# Altium integrated library LIB2.IntLib: 62 symbols
Pins are listed as number, name and electrical type; pins without a type are passive.

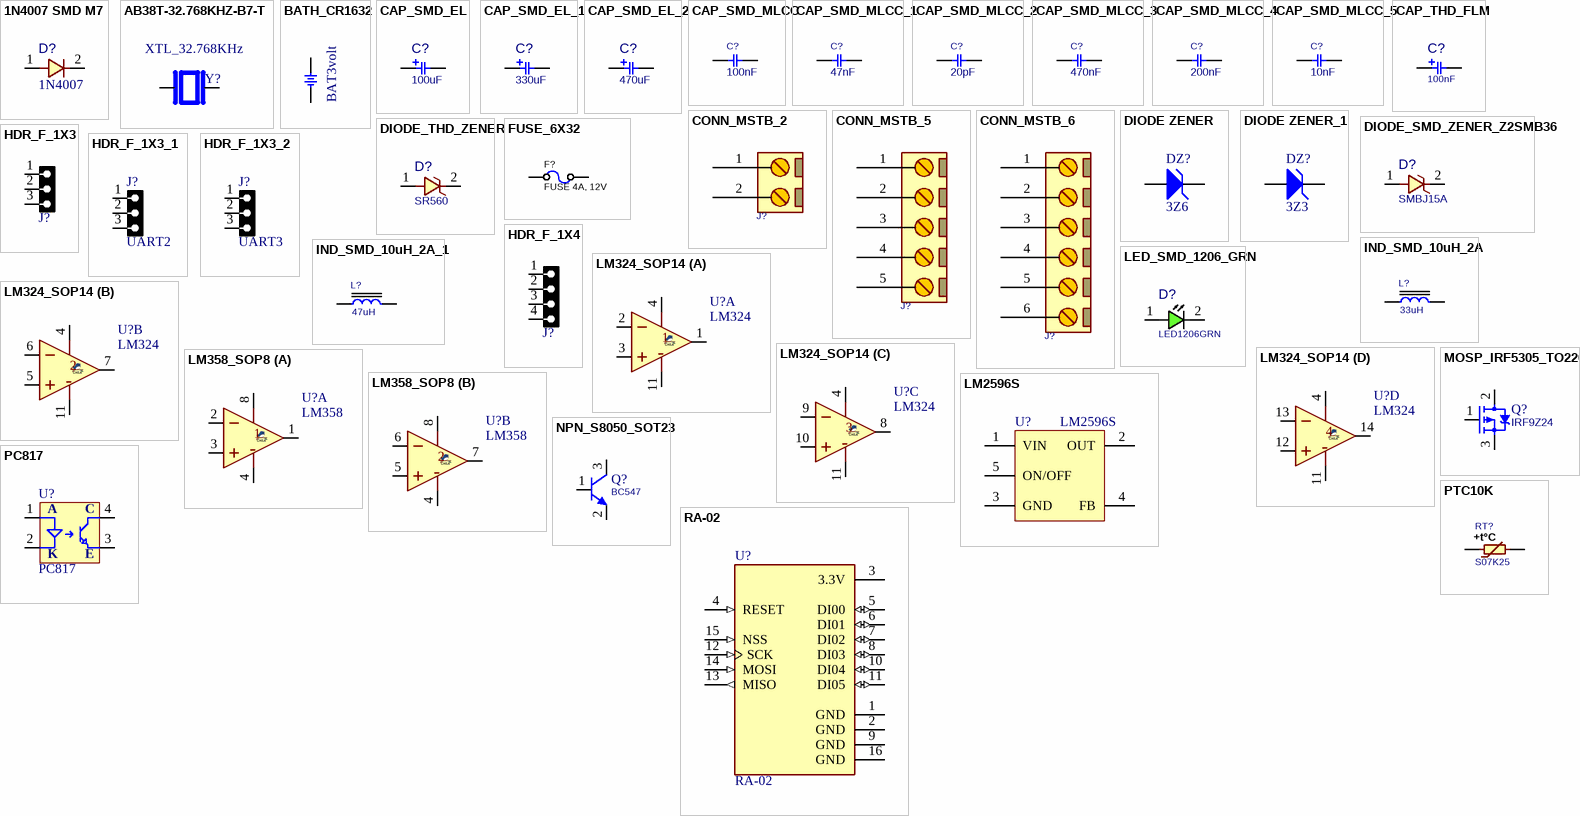
[diagram p0: symbols 1N4007 SMD M7 to RA-02]

## 1N4007 SMD M7
designator D?, comment value 1N4007  (hidden comment: 1n5819 SMD SS31)
DIODE, GENERAL PURPOSE, 1000V/1A; DatasheetVersion: 2021; ComponentLink1Description: Website Smart World; ComponentLink1URL: https://www.smartw.ir/; ComponentLink2Description: Telegram; ComponentLink2URL: https://t.me/altium_smartw; ComponentLink3Description: Instagram; ComponentLink3URL: https://Instagram.com/smartgw.ir
footprint D_SMA (SMA Molded Diode, 2-Leads, Body 4.3x2.7mm)
pins: 1, 2

## AB38T-32.768KHZ-B7-T
designator Y?, comment XTL_32.768KHz
MP: AB38T-32.768KHZ-B7-T; Package: None; Availability: Unavailable; Value: *; Price: None
footprint XTAL_AB38T-32.768KHZ-B7-T
pins: 1, 2

## BATH_CR1632
designator BT?, comment BAT3volt
BATTERY HOLDER, CR1632 CR1620 CR1616; MANF_P#: BH600; .: http://www.chila.ir; VALUE: BAT3volt
footprint BTH1632_BH600 (Battery Holder BH600 CR1632 CR1620 CR1616)
pins: 1, 2

## CAP_SMD_EL
designator C?, comment 100uF
CAP, SMD, ELEC,; MANF_P#: MANF_PART#; PARAM2: -V; DESC: DESCRIPTION; DIST#: MOUSER; PARAM: 20%; PRICE: 10= -$; MANF: MANF; ASSEMBLY: ASSEMBLY; VALUE: 100uF
footprint C_EL_D8L6 (Electrolytic Cap, 8.3X6)
footprint C_EL_D4L4 (Electrolytic Cap, D: 4.3mm, Size B, 3.9mm Height)
footprint C_EL_D5L6 (Electrolytic Cap, D: 5.0mm, L: 5.8mm, Size C)
footprint C_EL_D6L5 (Electrolytic Cap, D: 6.3mm L: 5.4mm, Size D)
footprint C_EL_D10L9 (Electrolytic Cap, 10.3mm, L: 8.7mm)
footprint C_EL_D12L13 (Electrolytic Cap, 12.5x13mm)
footprint C_EL_D4L5 (Electrolytic Cap, D: 4.3mm, Size B, 5.5mm Height)
footprint C_EL_D3L5 (Electrolytic Cap, D: 3.3mm, Size A, 5mm Height)
footprint C_EL_D6L4 (Electrolytic Cap, D: 6.3mm L: 3.9mm, Size D)
footprint C_EL_D6L5A (Electrolytic Cap, D: 6.3mm L: 5.4mm, Size D)
footprint C_EL_D6L6 (Electrolytic Cap, D: 6.3mm L: 5.8mm, Size D)
footprint C_EL_D6L8 (Electrolytic Cap, D: 6.3mm L: 7.7mm, Size D)
footprint C_EL_D8L10 (Electrolytic Cap, Size E, Size F, 8.3X10)
footprint C_EL_D10L10 (Electrolytic Cap, 10.3mm, L: 10mm)
footprint C_EL_D10L12 (Electrolytic Cap, 10.3mm, L: 12.4mm)
footprint C_EL_D17L17 (Electrolytic Cap, 17x17mm)
footprint C_EL_D19L17 (Electrolytic Cap, 19x17mm)
footprint C_EL_D8L10A (Electrolytic Cap, Size E, Size F, 8.3X10)
footprint C_EL_D5L5 (Electrolytic Cap, D: 5.0mm, L: 5.4mm)
pins: 1, 2

## CAP_SMD_EL_1
designator C?, comment 330uF
CAP, SMD, ELEC,; MANF_P#: MANF_PART#; PARAM2: -V; DESC: DESCRIPTION; DIST#: MOUSER; PARAM: 20%; PRICE: 10= -$; MANF: MANF; ASSEMBLY: ASSEMBLY; VALUE: 330uF
footprint C_EL_D8L6 (Electrolytic Cap, 8.3X6)
footprint C_EL_D4L4 (Electrolytic Cap, D: 4.3mm, Size B, 3.9mm Height)
footprint C_EL_D5L6 (Electrolytic Cap, D: 5.0mm, L: 5.8mm, Size C)
footprint C_EL_D6L5 (Electrolytic Cap, D: 6.3mm L: 5.4mm, Size D)
footprint C_EL_D10L9 (Electrolytic Cap, 10.3mm, L: 8.7mm)
footprint C_EL_D12L13 (Electrolytic Cap, 12.5x13mm)
footprint C_EL_D4L5 (Electrolytic Cap, D: 4.3mm, Size B, 5.5mm Height)
footprint C_EL_D3L5 (Electrolytic Cap, D: 3.3mm, Size A, 5mm Height)
footprint C_EL_D6L4 (Electrolytic Cap, D: 6.3mm L: 3.9mm, Size D)
footprint C_EL_D6L5A (Electrolytic Cap, D: 6.3mm L: 5.4mm, Size D)
footprint C_EL_D6L6 (Electrolytic Cap, D: 6.3mm L: 5.8mm, Size D)
footprint C_EL_D6L8 (Electrolytic Cap, D: 6.3mm L: 7.7mm, Size D)
footprint C_EL_D8L10 (Electrolytic Cap, Size E, Size F, 8.3X10)
footprint C_EL_D10L10 (Electrolytic Cap, 10.3mm, L: 10mm)
footprint C_EL_D10L12 (Electrolytic Cap, 10.3mm, L: 12.4mm)
footprint C_EL_D17L17 (Electrolytic Cap, 17x17mm)
footprint C_EL_D19L17 (Electrolytic Cap, 19x17mm)
footprint C_EL_D8L10A (Electrolytic Cap, Size E, Size F, 8.3X10)
footprint C_EL_D5L5 (Electrolytic Cap, D: 5.0mm, L: 5.4mm)
pins: 1, 2

## CAP_SMD_EL_2
designator C?, comment 470uF
CAP, SMD, ELEC,; MANF_P#: MANF_PART#; PARAM2: -V; DESC: DESCRIPTION; DIST#: MOUSER; PARAM: 20%; PRICE: 10= -$; MANF: MANF; ASSEMBLY: ASSEMBLY; VALUE: 470uF
footprint C_EL_D8L6 (Electrolytic Cap, 8.3X6)
footprint C_EL_D4L4 (Electrolytic Cap, D: 4.3mm, Size B, 3.9mm Height)
footprint C_EL_D5L6 (Electrolytic Cap, D: 5.0mm, L: 5.8mm, Size C)
footprint C_EL_D6L5 (Electrolytic Cap, D: 6.3mm L: 5.4mm, Size D)
footprint C_EL_D10L9 (Electrolytic Cap, 10.3mm, L: 8.7mm)
footprint C_EL_D12L13 (Electrolytic Cap, 12.5x13mm)
footprint C_EL_D4L5 (Electrolytic Cap, D: 4.3mm, Size B, 5.5mm Height)
footprint C_EL_D3L5 (Electrolytic Cap, D: 3.3mm, Size A, 5mm Height)
footprint C_EL_D6L4 (Electrolytic Cap, D: 6.3mm L: 3.9mm, Size D)
footprint C_EL_D6L5A (Electrolytic Cap, D: 6.3mm L: 5.4mm, Size D)
footprint C_EL_D6L6 (Electrolytic Cap, D: 6.3mm L: 5.8mm, Size D)
footprint C_EL_D6L8 (Electrolytic Cap, D: 6.3mm L: 7.7mm, Size D)
footprint C_EL_D8L10 (Electrolytic Cap, Size E, Size F, 8.3X10)
footprint C_EL_D10L10 (Electrolytic Cap, 10.3mm, L: 10mm)
footprint C_EL_D10L12 (Electrolytic Cap, 10.3mm, L: 12.4mm)
footprint C_EL_D17L17 (Electrolytic Cap, 17x17mm)
footprint C_EL_D19L17 (Electrolytic Cap, 19x17mm)
footprint C_EL_D8L10A (Electrolytic Cap, Size E, Size F, 8.3X10)
footprint C_EL_D5L5 (Electrolytic Cap, D: 5.0mm, L: 5.4mm)
pins: 1, 2

## CAP_SMD_MLCC
designator C?, comment 100nF
CAP, MLCC; PARAM: C0G, 10%; DESC: CAP, MLCC, 1nF, 50V, C0G, 10%, 0402; MANF_P#: MANF_PART#; MANF: Murata; PARAM2: 50V; VALUE: 20pF; PRICE: 100= 1$; ASSEMBLY: ASSEMBLY
footprint C0402 (CHIP Capacitor, 1.0X0.5mm, 0402)
footprint C0603 (CHIP Capacitor, 1.6X0.8mm, 0603)
footprint C0805 (CHIP Capacitor, 2.0X1.3mm, 0805)
footprint C1206 (CHIP Capacitor, 3.2X1.6mm, 1206)
footprint C1210 (CHIP Capacitor, 3.2X2.5mm, 1210, 3225)
footprint C0508 (CHIP Capacitor, 1.3X2.0mm, 0508)
footprint C1020 (CHIP Capacitor, 2.50x5.00mm)
footprint C1808 (CHIP Capacitor, 4.6X2.0mm, 1808, 1806, 4620, 4520)
footprint C1812 (Chip Capacitor, 4.5x3.2mm, 1612, 1812, 4532)
footprint C1825 (Chip Capacitor, 4.5x6.4mm, 1825, 4564)
footprint C2225 (Chip Capacitor, 5.6x6.4mm, 2225, 5664)
footprint C2512 (Chip Capacitor, 6.4x3.2mm, 2512, 6432)
footprint C0201 (CHIP Capacitor, 0.5x0.25mm, 0201)
footprint C0306 (CHIP Capacitor, 0.8X1.6mm)
footprint C0204 (CHIP Capacitor, 0.5X1.0mm)
footprint C2010 (Chip Capacitor, 5.0x2.5mm)
pins: 1, 2

## CAP_SMD_MLCC_1
designator C?, comment 47nF
CAP, MLCC; PARAM: C0G, 10%; DESC: CAP, MLCC, 1nF, 50V, C0G, 10%, 0402; MANF_P#: MANF_PART#; MANF: Murata; PARAM2: 50V; VALUE: 20pF; PRICE: 100= 1$; ASSEMBLY: ASSEMBLY
footprint C0402 (CHIP Capacitor, 1.0X0.5mm, 0402)
footprint C0603 (CHIP Capacitor, 1.6X0.8mm, 0603)
footprint C0805 (CHIP Capacitor, 2.0X1.3mm, 0805)
footprint C1206 (CHIP Capacitor, 3.2X1.6mm, 1206)
footprint C1210 (CHIP Capacitor, 3.2X2.5mm, 1210, 3225)
footprint C0508 (CHIP Capacitor, 1.3X2.0mm, 0508)
footprint C1020 (CHIP Capacitor, 2.50x5.00mm)
footprint C1808 (CHIP Capacitor, 4.6X2.0mm, 1808, 1806, 4620, 4520)
footprint C1812 (Chip Capacitor, 4.5x3.2mm, 1612, 1812, 4532)
footprint C1825 (Chip Capacitor, 4.5x6.4mm, 1825, 4564)
footprint C2225 (Chip Capacitor, 5.6x6.4mm, 2225, 5664)
footprint C2512 (Chip Capacitor, 6.4x3.2mm, 2512, 6432)
footprint C0201 (CHIP Capacitor, 0.5x0.25mm, 0201)
footprint C0306 (CHIP Capacitor, 0.8X1.6mm)
footprint C0204 (CHIP Capacitor, 0.5X1.0mm)
footprint C2010 (Chip Capacitor, 5.0x2.5mm)
pins: 1, 2

## CAP_SMD_MLCC_2
designator C?, comment 20pF
CAP, MLCC; PARAM: C0G, 10%; DESC: CAP, MLCC, 1nF, 50V, C0G, 10%, 0402; MANF_P#: MANF_PART#; MANF: Murata; PARAM2: 50V; PRICE: 100= 1$; ASSEMBLY: ASSEMBLY; VALUE: 20pF
footprint C0402 (CHIP Capacitor, 1.0X0.5mm, 0402)
footprint C0603 (CHIP Capacitor, 1.6X0.8mm, 0603)
footprint C0805 (CHIP Capacitor, 2.0X1.3mm, 0805)
footprint C1206 (CHIP Capacitor, 3.2X1.6mm, 1206)
footprint C1210 (CHIP Capacitor, 3.2X2.5mm, 1210, 3225)
footprint C0508 (CHIP Capacitor, 1.3X2.0mm, 0508)
footprint C1020 (CHIP Capacitor, 2.50x5.00mm)
footprint C1808 (CHIP Capacitor, 4.6X2.0mm, 1808, 1806, 4620, 4520)
footprint C1812 (Chip Capacitor, 4.5x3.2mm, 1612, 1812, 4532)
footprint C1825 (Chip Capacitor, 4.5x6.4mm, 1825, 4564)
footprint C2225 (Chip Capacitor, 5.6x6.4mm, 2225, 5664)
footprint C2512 (Chip Capacitor, 6.4x3.2mm, 2512, 6432)
footprint C0201 (CHIP Capacitor, 0.5x0.25mm, 0201)
footprint C0306 (CHIP Capacitor, 0.8X1.6mm)
footprint C0204 (CHIP Capacitor, 0.5X1.0mm)
footprint C2010 (Chip Capacitor, 5.0x2.5mm)
pins: 1, 2

## CAP_SMD_MLCC_3
designator C?, comment 470nF
CAP, MLCC; PARAM: C0G, 10%; DESC: CAP, MLCC, 1nF, 50V, C0G, 10%, 0402; MANF_P#: MANF_PART#; MANF: Murata; PARAM2: 50V; VALUE: 20pF; PRICE: 100= 1$; ASSEMBLY: ASSEMBLY
footprint C0402 (CHIP Capacitor, 1.0X0.5mm, 0402)
footprint C0603 (CHIP Capacitor, 1.6X0.8mm, 0603)
footprint C0805 (CHIP Capacitor, 2.0X1.3mm, 0805)
footprint C1206 (CHIP Capacitor, 3.2X1.6mm, 1206)
footprint C1210 (CHIP Capacitor, 3.2X2.5mm, 1210, 3225)
footprint C0508 (CHIP Capacitor, 1.3X2.0mm, 0508)
footprint C1020 (CHIP Capacitor, 2.50x5.00mm)
footprint C1808 (CHIP Capacitor, 4.6X2.0mm, 1808, 1806, 4620, 4520)
footprint C1812 (Chip Capacitor, 4.5x3.2mm, 1612, 1812, 4532)
footprint C1825 (Chip Capacitor, 4.5x6.4mm, 1825, 4564)
footprint C2225 (Chip Capacitor, 5.6x6.4mm, 2225, 5664)
footprint C2512 (Chip Capacitor, 6.4x3.2mm, 2512, 6432)
footprint C0201 (CHIP Capacitor, 0.5x0.25mm, 0201)
footprint C0306 (CHIP Capacitor, 0.8X1.6mm)
footprint C0204 (CHIP Capacitor, 0.5X1.0mm)
footprint C2010 (Chip Capacitor, 5.0x2.5mm)
pins: 1, 2

## CAP_SMD_MLCC_4
designator C?, comment 200nF
CAP, MLCC; PARAM: C0G, 10%; DESC: CAP, MLCC, 1nF, 50V, C0G, 10%, 0402; MANF_P#: MANF_PART#; MANF: Murata; PARAM2: 50V; VALUE: 20pF; PRICE: 100= 1$; ASSEMBLY: ASSEMBLY
footprint C0402 (CHIP Capacitor, 1.0X0.5mm, 0402)
footprint C0603 (CHIP Capacitor, 1.6X0.8mm, 0603)
footprint C0805 (CHIP Capacitor, 2.0X1.3mm, 0805)
footprint C1206 (CHIP Capacitor, 3.2X1.6mm, 1206)
footprint C1210 (CHIP Capacitor, 3.2X2.5mm, 1210, 3225)
footprint C0508 (CHIP Capacitor, 1.3X2.0mm, 0508)
footprint C1020 (CHIP Capacitor, 2.50x5.00mm)
footprint C1808 (CHIP Capacitor, 4.6X2.0mm, 1808, 1806, 4620, 4520)
footprint C1812 (Chip Capacitor, 4.5x3.2mm, 1612, 1812, 4532)
footprint C1825 (Chip Capacitor, 4.5x6.4mm, 1825, 4564)
footprint C2225 (Chip Capacitor, 5.6x6.4mm, 2225, 5664)
footprint C2512 (Chip Capacitor, 6.4x3.2mm, 2512, 6432)
footprint C0201 (CHIP Capacitor, 0.5x0.25mm, 0201)
footprint C0306 (CHIP Capacitor, 0.8X1.6mm)
footprint C0204 (CHIP Capacitor, 0.5X1.0mm)
footprint C2010 (Chip Capacitor, 5.0x2.5mm)
pins: 1, 2

## CAP_SMD_MLCC_5
designator C?, comment 10nF
CAP, MLCC; PARAM: C0G, 10%; DESC: CAP, MLCC, 1nF, 50V, C0G, 10%, 0402; MANF_P#: MANF_PART#; MANF: Murata; PARAM2: 50V; VALUE: 20pF; PRICE: 100= 1$; ASSEMBLY: ASSEMBLY
footprint C0402 (CHIP Capacitor, 1.0X0.5mm, 0402)
footprint C0603 (CHIP Capacitor, 1.6X0.8mm, 0603)
footprint C0805 (CHIP Capacitor, 2.0X1.3mm, 0805)
footprint C1206 (CHIP Capacitor, 3.2X1.6mm, 1206)
footprint C1210 (CHIP Capacitor, 3.2X2.5mm, 1210, 3225)
footprint C0508 (CHIP Capacitor, 1.3X2.0mm, 0508)
footprint C1020 (CHIP Capacitor, 2.50x5.00mm)
footprint C1808 (CHIP Capacitor, 4.6X2.0mm, 1808, 1806, 4620, 4520)
footprint C1812 (Chip Capacitor, 4.5x3.2mm, 1612, 1812, 4532)
footprint C1825 (Chip Capacitor, 4.5x6.4mm, 1825, 4564)
footprint C2225 (Chip Capacitor, 5.6x6.4mm, 2225, 5664)
footprint C2512 (Chip Capacitor, 6.4x3.2mm, 2512, 6432)
footprint C0201 (CHIP Capacitor, 0.5x0.25mm, 0201)
footprint C0306 (CHIP Capacitor, 0.8X1.6mm)
footprint C0204 (CHIP Capacitor, 0.5X1.0mm)
footprint C2010 (Chip Capacitor, 5.0x2.5mm)
pins: 1, 2

## CAP_THD_FLM
designator C?, comment 100nF
CAP, THD, FILM,; MANF_P#: MANF_PART#; PARAM2: 25V; DESC: DESCRIPTION; DIST#: MOUSER; PARAM: 20%; PRICE: 10= 5$; MANF: MANF; ASSEMBLY: ASSEMBLY; VALUE: 100nF
footprint C_FLM_4X2H7 (Capacitor, THT, Metallized Polyester Film 4.6X2.5X6.8mm)
footprint C_FLM_4X3H7 (Capacitor, THT, Metallized Polyester Film, 4.6x3.0x7.5mm)
footprint C_FLM_4X4H8 (Capacitor, THT, Metallized Polyester Film with 4.6x3.8x8.5mm LxTxH)
footprint C_FLM_4X4H9 (Capacitor, THT, Metallized Polyester Film, 4.6x4.6x9.2mm)
footprint C_FLM_4X5H10 (Capacitor, THT, Metallized Polyester Film, 4.6x5.5x10.6mm)
footprint C_FLM_6X2H5 (CAP, FILM MKT, 6.3X2.4mm, pitch: 4.7mm)
footprint C_FLM_6X3H5 (CAP, POLYESTER, 5.8X3.5mm pitch: 5.0mm)
footprint C_FLM_6X4H12 (Capacitor, THT, Metallized Polyester Film, 6x4x12mm)
footprint C_FLM_7X2H6 (Capacitor, THT, Metallized Polyester Film with 7.2x2.5x6.5mm LxTxH)
footprint C_FLM_7X2H7 (CAP, POLYESTER, 7.5x2.5x7mm pitch: 5.0mm)
footprint C_FLM_7X3H6 (Capacitor, THT, Metallized Polyester Film with 7.2x3.0x6.5mm LxTxH)
footprint C_FLM_7X3H6R (Capacitor, THT, Metallized Polyester Film with 7.2x3.0x6.5mm LxTxH)
footprint C_FLM_7X3H8 (Capacitor, THT, Metallized Polyester Film with 7.2x3.5x8.5mm LxTxH)
footprint C_FLM_7X3H8R (Capacitor, THT, Metallized Polyester Film with 7.2x3.5x8.0mm LxTxH)
footprint C_FLM_7X4H6 (Capacitor, THT, Metallized Polyester Film with 7.2x4.5x6mm LxTxH)
footprint C_FLM_7X4H9 (Capacitor, THT, Metallized Polyester Film with 7.2x4.5x9.5mm LxTxH)
footprint C_FLM_7X5H7 (Capacitor, THT, Metallized Polyester Film with 7.2x5.5x7mm LxTxH)
footprint C_FLM_7X5H9R (Capacitor, THT, Metallized Polyester Film with 7.6x5.0x9.2mm LxTxH)
footprint C_FLM_7X5H10 (Capacitor, THT, Metallized Polyester Film with 7.2x5.0x10mm LxTxH)
footprint C_FLM_7X5H11 (Capacitor, THT, Metallized Polyester Film with 7.2x5.5x11.5mm LxTxH)
footprint C_FLM_7X5X10 (CAP, POLYESTER, 7.0X5.0x10mm pitch: 5.0mm)
footprint C_FLM_7X6H8 (CAP, POLYESTER, 7.3X6.5mm pitch: 5.0mm)
footprint C_FLM_7X6H7 (Capacitor, THT, Metallized Polyester Film with 7.2x6.5x7.0mm LxTxH)
footprint C_FLM_7X6H10 (Capacitor, THT, Metallized Polyester Film, 7.3x6.5x10)
footprint C_FLM_7X7H8 (Capacitor, THT, Metallized Polyester Film with 7.2x7.2x8.5mm LxTxH)
footprint C_FLM_7X7H10R (Capacitor, THT, Metallized Polyester Film with 7.6x7.0x10.6mm TxHxW)
footprint C_FLM_7X7H13 (Capacitor, THT, Metallized Polyester Film with 7.2x7.2x13mm LxTxH)
footprint C_FLM_7X8H10 (Capacitor, THT, Metallized Polyester Film with 7.2x8.5x10mm LxTxH)
footprint C_FLM_7X8H14 (Capacitor, THT, Metallized Polyester Film with 7.2x8.5x14mm LxTxH)
footprint C_FLM_7X9H10 (CAP, POLYESTER, 7.2X8.5x10mm pitch: 5.0mm)
footprint C_FLM_7X11H16 (Capacitor, THT, Metallized Polyester Film with 7.2x11x16mm LxTxH)
footprint C_FLM_8X8H13R (Capacitor, THT, Metallized Polyester Film with 7.8x7.8x13.0mm LxTxH)
footprint C_FLM_9X6H9 (CAP, POLYESTER, 9.3X5.2mm pitch: 7.6mm)
footprint C_FLM_10X2H7 (Capacitor, THT, Metallized Polyester Film 10x2.5x7mm LxTxH)
footprint C_FLM_10X3H7 (Capacitor, THT, Metallized Polyester Film 10x3x7mm LxTxH)
footprint C_FLM_10X4H7 (Capacitor, THT, Metallized Polyester Film 10x4.5x7mm LxTxH)
footprint C_FLM_10X4H8R (Capacitor, THT, Metallized Polyester Film with 3.5x9.5x10.0mm TxHxW)
footprint C_FLM_10X5H7 (Capacitor, THT, Metallized Polyester Film 10x5x7mm LxTxH)
footprint C_FLM_10X5H8 (CAP, POLYESTER, 10X5.5mm pitch: 7.6mm)
footprint C_FLM_10X6H7 (Capacitor, THT, Metallized Polyester Film with 10x5.7x7mm LxTxH)
footprint C_FLM_10X6X9 (CAP, POLYESTER, 10.5X6.0X9.0mm pitch: 7.6mm)
footprint C_FLM_10X6X12 (CAP, POLYESTER, 10.3X6.0X12.0mm pitch: 7.6mm)
footprint C_FLM_10X7H7 (Capacitor, THT, Metallized Polyester Film 10x7.2x7mm LxTxH)
footprint C_FLM_10X8H9 (CAP, POLYESTER, 10.0X8.0 pitch: 7.6mm)
footprint C_FLM_11X4H8 (CAP, POLYESTER, 11.4X3.8X7.8mm pitch: 10mm, 0.1uF 400V)
footprint C_FLM_12X4H9 (CAP, POLYESTER, 12.5X4.5X9.0 pitch: 10mm)
footprint C_FLM_12X4H10 (Capacitor, THT, Metallized Polyester Film. 12.5x4.5x10mm)
footprint C_FLM_13X3H8 (Capacitor, THT, Metallized Polyester Film 13x3x8.5mm LxTxH)
footprint C_FLM_13X3H9 (Capacitor, THT, Metallized Polyester Film with 13x3x9mm LxTxH)
footprint C_FLM_13X4H8 (Capacitor, THT, Metallized Polyester Film 13.5x4x8.5mm LxTxH)
footprint C_FLM_13X4H9 (Capacitor, THT, Metallized Polyester Film 13x4x9.5mm LxTxH)
footprint C_FLM_13X5H9 (CAP, POLYESTER, 12.8X4.8 pitch: 10mm)
footprint C_FLM_13X5H10 (Capacitor, THT, Metallized Polyester Film 13x5x10mm LxTxH)
footprint C_FLM_13X5H11 (Capacitor, THT, Metallized Polyester Film 13x5x11mm LxTxH)
footprint C_FLM_13X5H12 (Capacitor, THT, Metallized Polyester Film 13x5x12mm LxTxH)
footprint C_FLM_13X6H12 (Capacitor, THT, Metallized Polyester Film with 13x6x12.5mm LxTxH)
footprint C_FLM_13X6H13 (Capacitor, THT, Metallized Polyester Film 13x6x13mm LxTxH)
footprint C_FLM_13X8H12 (Capacitor, THT, Metallized Polyester Film 13x8x12mm LxTxH)
footprint C_FLM_17X7H14 (CAP, POLYESTER, 17X7mm pitch: 15.0mm, 0.33uF 400V)
footprint C_FLM_18X5H11 (Capacitor, THT, Metallized Polyester Film 18x5x11mm LxTxH)
footprint C_FLM_18X6H12 (Capacitor, THT, Metallized Polyester Film 18x6x12.5mm LxTxH)
footprint C_FLM_18X7H14 (Capacitor, THT, Metallized Polyester Film 18x7x14mm LxTxH)
footprint C_FLM_18X8H15 (Capacitor, THT, Metallized Polyester Film 18x8x15mm LxTxH)
footprint C_FLM_18X9H14 (Capacitor, THT, Metallized Polyester Film 18x9x14mm LxTxH)
footprint C_FLM_18X9H16 (Capacitor, THT, Metallized Polyester Film 18x9x16mm LxTxH)
footprint C_FLM_18X11H14 (Capacitor, THT, Metallized Polyester Film 18x11x14mm LxTxH)
footprint C_FLM_19X5H13 (Capacitor, THT, Metallized Polyester Film 19x5x13mm LxTxH)
footprint C_FLM_19X6H14 (Capacitor, THT, Metallized Polyester Film 19x6x14mm LxTxH)
footprint C_FLM_19X7H15 (Capacitor, THT, Metallized Polyester Film 19x7x15mm LxTxH)
footprint C_FLM_19X8H11 (CAP, POLYESTER, MKT, 18X5, 19.0X8.0mm pitch: 15.0mm, 0.22uF 400V)
footprint C_FLM_19X8H17 (Capacitor, THT, Metallized Polyester Film 19x8x17mm LxTxH)
footprint C_FLM_19X10H18 (Capacitor, THT, Metallized Polyester Film 19x10x18 LxTxH)
footprint C_FLM_22X7H14 (CAP, POLYESTER, 33.0X7.0mm pitch: 20.0mm, 0.68uF 400V)
footprint C_FLM_24X6H9 (CAP, POLYESTER, 23.8X5.8mm pitch: 20.0mm, 0.33uF 400V)
footprint C_FLM_25X10H20 (Capacitor, THT, Metallized Polyester Film, 25x10x20)
footprint C_FLM_25X10H21 (Capacitor, THT, Metallized Polyester Film, 25x10x21mm)
footprint C_FLM_26X5H14 (Capacitor, THT, Metallized Polyester Film 26.5x5x14mm LxTxH)
footprint C_FLM_26X6H15 (Capacitor, THT, Metallized Polyester Film 26.5x6x15mm LxTxH)
footprint C_FLM_26X7H16 (Capacitor, THT, Metallized Polyester Film with 26.5x7x16.5mm LxTxH)
footprint C_FLM_26X8H15 (CAP, POLYESTER, 26.0X7.8mm pitch: 22.5mm, 0.68uF 400V)
footprint C_FLM_26X8H18 (Capacitor, THT, Metallized Polyester Film with 26.5x8.5x18.5mm LxTxH)
footprint C_FLM_26X9H14 (CAP, POLYESTER, 26.0X9.3mm pitch: 22.5mm, 0.68uF 400V)
footprint C_FLM_26X10H19 (Capacitor, THT, Metallized Polyester Film with 26.5x10.5x19mm LxTxH)
footprint C_FLM_26X10H20 (Capacitor, THT, Metallized Polyester Film with 26.5x10.5x20.5mm LxTxH)
footprint C_FLM_26X11H21 (Capacitor, THT, Metallized Polyester Film with 26.5x11x21mm LxTxH)
footprint C_FLM_28X8H20 (Capacitor, THT, Metallized Polyester Film with 28x8x20mm LxTxH)
footprint C_FLM_28X10H20 (Capacitor, THT, Metallized Polyester Film with 28x10x20mm LxTxH)
footprint C_FLM_28X12H21 (Capacitor, THT, Metallized Polyester Film with 28x12x21mm LxTxH)
pins: 1, 2

## CONN_MSTB_2
designator J?, comment CONN_TB2  (value not drawn)
CONN, PHOENIX MSTB, 5-G, 5.08mm pitch; PARAM2: 320V; PARAM: 12A; VALUE: CONN_TB2
footprint MSTB_2 (PHOENIX MSTB 2, 5-G, 5.08mm pitch, 2pin)
pins: 1, 2

## CONN_MSTB_5
designator J?, comment CONN_TB5  (value not drawn)
CONN, PHOENIX MSTB, 5-G, 5.08mm pitch; PARAM2: 320V; PARAM: 12A; VALUE: CONN_TB5
footprint MSTB_5 (PHOENIX MSTB 2, 5-G, 5.08mm pitch)
pins: 1, 2, 3, 4, 5

## CONN_MSTB_6
designator J?, comment CONN_TB6  (value not drawn)
CONN, PHOENIX MSTB, 5-G, 5.08mm pitch; PARAM2: 320V; PARAM: 12A; VALUE: CONN_TB6
footprint MSTB_6 (PHOENIX MSTB 2, 5-G, 5.08mm pitch)
pins: 1, 2, 3, 4, 5, 6

## DIODE ZENER
designator DZ?, comment 3Z6
footprint MELF
footprint SOD 87
footprint MELF Mini
pins: 1 A, 2 K

## DIODE ZENER_1
designator DZ?, comment 3Z3
footprint MELF
footprint SOD 87
footprint MELF Mini
pins: 1 A, 2 K

## DIODE_SMD_ZENER_Z2SMB36
designator D?, comment SMBJ15A
DIODE, ZENER, 2W, 36V; MANF: Diotec; DESC: DESCRIPTION; PARAM: 2W, 16Ohm, -50~150°C; MANF_P#: Z2SMB36; ASSEMBLY: ASSEMBLY; PRICE: -; PARAM2: 36V; VALUE: SMBJ15A
footprint D_SMB (SMB Molded Diode, 2-Leads, Body 4.3x3.5mm)
pins: 1, 2

## DIODE_THD_ZENER
designator D?, comment SR560
DIODE, ZENER, 0.2W, 15V; MANF: Diodes; DESC: DESCRIPTION; MANF_P#: ZENER15V; ASSEMBLY: ASSEMBLY; PRICE: PRICE; PARAM2: 0.2W; PARAM: 15V; VALUE: SR560
footprint D_AX04_DO41 (DO-41)
footprint D_AX02_DO35 (DIODE 0.2 INCH SPACING DO-35)
footprint D_AX03_DO35
pins: 1, 2

## FUSE_6X32
designator F?, comment FUSE 4A, 12V
Fuse HOLDER 5X20; PARAM: 30A; MANF_P#: MANF_PART#; PARAM2: 125VAC; MANF: MANF; VALUE: FUSE 4A, 12V
footprint FUSH_6X32MM_4PIN (PCB Fuse Holder 6x32mm 2 PIN, pitch: 15.0mm  24x9mm)
pins: 1, 2

## HDR_F_1X3
designator J?, comment HDRF3  (value not drawn)
CONN, HEADER, Female, pitch: 2.54mm, 3POS; VALUE: HDRF3
footprint HDR_F_1X3 (HEADER FEMALE pitch: 2.54mm)
pins: 1, 2, 3

## HDR_F_1X3_1
designator J?, comment UART2
CONN, HEADER, Female, pitch: 2.54mm, 3POS; VALUE: HDRF3
footprint HDR_F_1X3 (HEADER FEMALE pitch: 2.54mm)
pins: 1, 2, 3

## HDR_F_1X3_2
designator J?, comment UART3
CONN, HEADER, Female, pitch: 2.54mm, 3POS; VALUE: HDRF3
footprint HDR_F_1X3 (HEADER FEMALE pitch: 2.54mm)
pins: 1, 2, 3

## HDR_F_1X4
designator J?, comment HDRF4  (value not drawn)
CONN, HEADER, Female, pitch: 2.54mm, 4POS; VALUE: HDRF4
footprint HDR_F_1X4 (HEADER FEMALE pitch: 2.54mm)
pins: 1, 2, 3, 4

## IND_SMD_10uH_2A
designator L?, comment 33uH
INDUCTOR, 10uH 2A, 38mOhm, 2626; PARAM: 2A Irms, 2.05A Isat; MANF_P#: SRR6038-100Y; MANF: Bourns; PRICE: 2.5$; DESC: INDUCTOR, 10uH 2A, 38mOhm, 2626; PARAM2: 38mOhm; ASSEMBLY: ASSEMBLY; VALUE: 10uH
footprint L_7 (INDUCTOR, 7.2X6.9mm, 7.1X6.5mm, SPM6530)
pins: 1, 2

## IND_SMD_10uH_2A_1
designator L?, comment 47uH
INDUCTOR, 10uH 2A, 38mOhm, 2626; PARAM: 2A Irms, 2.05A Isat; MANF_P#: SRR6038-100Y; MANF: Bourns; PRICE: 2.5$; DESC: INDUCTOR, 10uH 2A, 38mOhm, 2626; PARAM2: 38mOhm; ASSEMBLY: ASSEMBLY; VALUE: 10uH
footprint L_7 (INDUCTOR, 7.2X6.9mm, 7.1X6.5mm, SPM6530)
pins: 1, 2

## LED_SMD_1206_GRN
designator D?, comment LED1206GRN
LED, SMD, 1206, GREEN; PARAM: 20mA; DESC: DESCRIPTION; PARAM2: 2.2V; MANF: -; ASSEMBLY: ASSEMBLY; PRICE: 36t@Javan; MANF_P#: -; VALUE: LED1206GRN
footprint LED1206GRN (LED, 1206, GREEN)
pins: 1 ANODE, 2 CATHODE

## LM324_SOP14
designator U?, comment LM324
AMP, Quad, Single-Supply; MANF: ON, Texas Instruments, ST; MANF_P#: LM324AD; VALUE: LM324
footprint SO_14
pins on every part: 4 V+, 11 V-
part A pins: 1 OUT, 2 IN-, 3 IN+
part B pins: 5 IN+, 6 IN-, 7 OUT
part C pins: 8 OUT, 9 IN-, 10 IN+
part D pins: 12 IN+, 13 IN-, 14 OUT

## LM358_SOP8
designator U?, comment LM358
AMP, Dual, Low-Power; MANF: Texas Instruments, Fairchild; MANF_P#: LM358AMX; PARAM2: 3 V ~ 32 V, ±1.5 V ~ 16 V; PRICE: 1=0.47, 25=0.31, 100=0.2547, 250=0.21224, 500=0.17632, 750=0.14692, 1000=0.1306 (USD); VALUE: LM358
footprint SO_8
pins on every part: 4 V-, 8 V+
part A pins: 1 OUT, 2 IN-, 3 IN+
part B pins: 5 IN+, 6 IN-, 7 OUT

## LM2596S
designator U?
footprint TO - 263
pins: 1 VIN, 2 OUT, 3 GND, 4 FB, 5 ON/OFF

## MOSP_IRF5305_TO220
designator Q?, comment IRF9Z24
MOSFET P-CHANNEL, 55V, -31A, 6mO, Vth-4.0; MANF_P#: IRF5305; ASSEMBLY: ASSEMBLY; VALUE: IRF9Z24
footprint TO220_3 (TO-220 3 LEAD, TO-262, pitch: 2.54mm  10x4.5mm)
pins: 1 G, 2 D, 3 S

## NPN_S8050_SOT23
designator Q?, comment BC547
BJT, NPN, 25v, 0.5A, SMD, SOT23; PARAM2: 300mW; MANF_P#: S8050; PARAM: 25v, 0.5A; MANF: -; VALUE: BC547
footprint SOT23_3 (SOT-23, Micro3, MO-178, TO-236AB, MO-193C, SuperSOT3, SC-59, DSO190_3_300X150)
simulation model NS3904
pins: 1 B, 2 E, 3 C

## PC817
designator U?
footprint DIP-4
footprint PC817
pins: 1 A, 2 K, 3 E, 4 C

## PTC10K
designator RT?, comment S07K25
Thermistor, NTC; MANF_P#: PTC; PARAM: 10K; MANF: -; PARAM2: -; PRICE: -; VALUE: S07K25
footprint NTC_15X6 (NTC, pitch 5mm, 15X6mm, B57153)
pins: 1, 2
text: +t°C

## RA-02
designator U?
General ISM < 1GHz LoRaâ„¢ Transceiver Module 410MHz ~ 525MHz Antenna Not Included, I-PEX Surface Mount; MF: Ai-Thinker; SnapEDA_Link: https://www.snapeda.com/parts/RA-02/AI-Thinker/view-part/?ref=snap; Package: None; Value: *; MP: RA-02; Check_prices: https://www.snapeda.com/parts/RA-02/AI-Thinker/view-part/?ref=eda
footprint RA-02
pins: 1 GND (power), 2 GND (power), 3 3.3V (power), 4 RESET (in), 5 DI00 (io), 6 DI01 (io), 7 DI02 (io), 8 DI03 (io), 9 GND (power), 10 DI04 (io), 11 DI05 (io), 12 SCK (in), 13 MISO (out), 14 MOSI (in), 15 NSS (in), 16 GND (power)

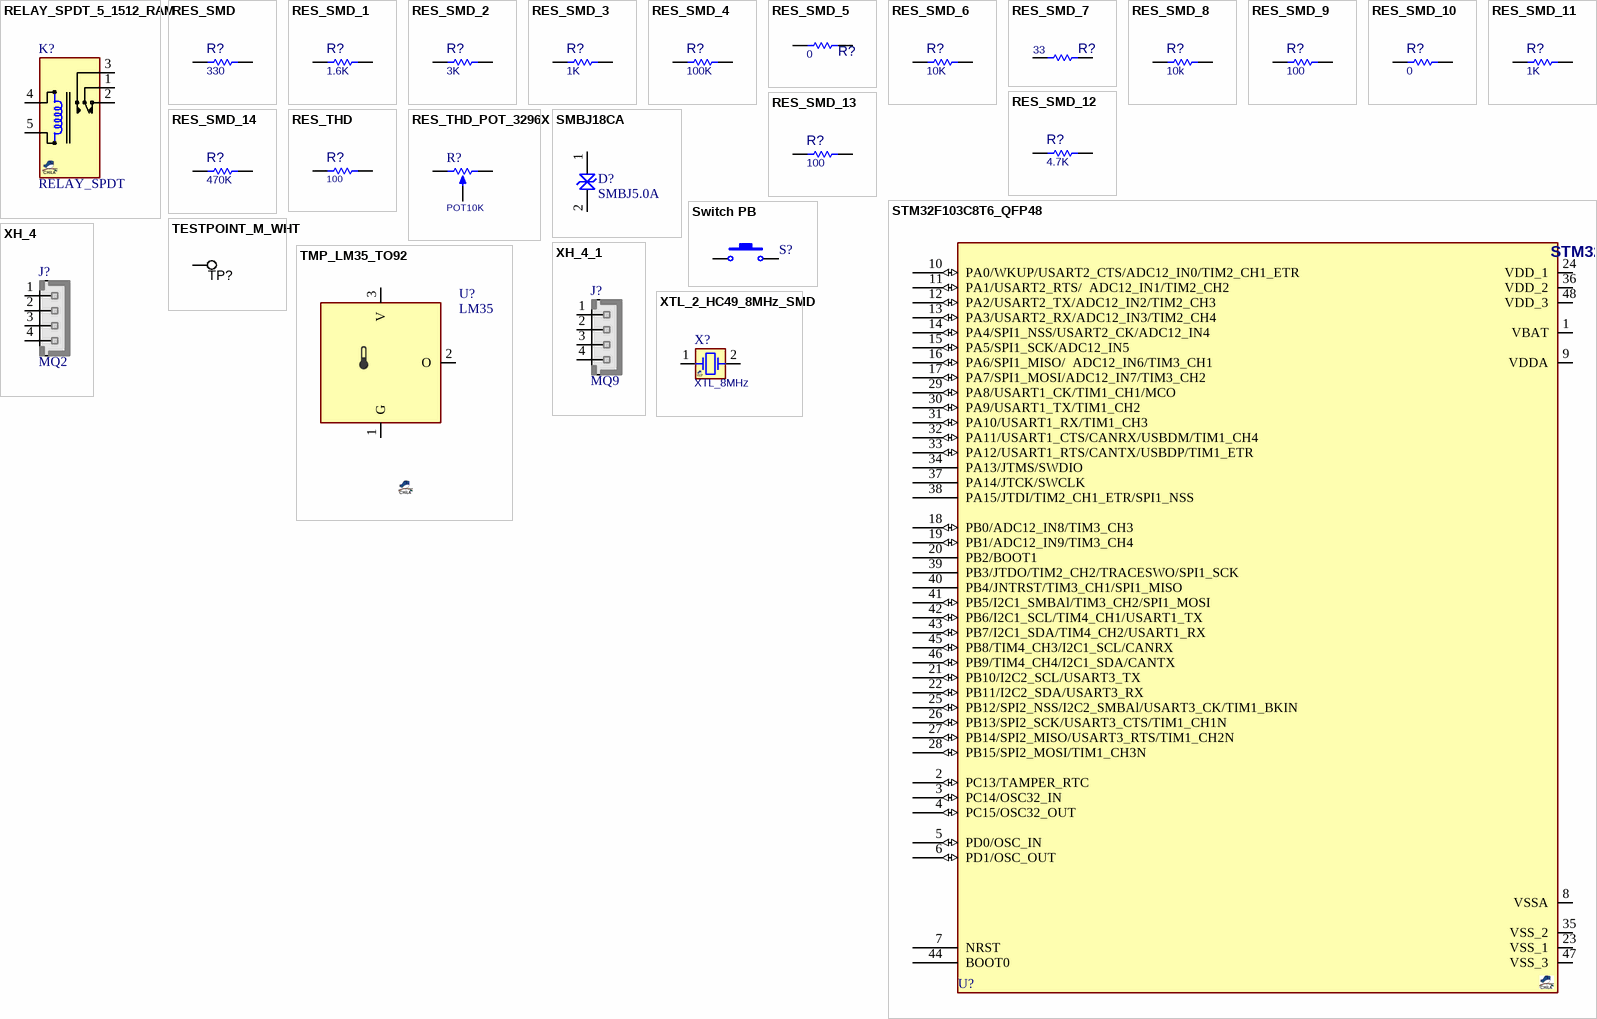
[diagram p1: symbols RELAY_SPDT_5_1512_RAM to XTL_2_HC49_8MHz_SMD]

## RELAY_SPDT_5_1512_RAM
designator K?, comment RELAY_SPDT
Relay, SPDT, 5P, 15.4X12.1mm, 14V/20A; MANF: SUN HOLD; MANF_P#: RAM-1C-12; PARAM2: 14V, 20A; PARAM: 12V, 50mA; PRICE: PRICE; Value: RELAY_SPDT
footprint REL_SPDT_5_1512 (RELAY, SPDT, 15.40x12.10x14.0mm, G8QN, SUN HOLD RAM)
simulation model SPDTRELAY (Spice Subcircuit)
pins: 1 COM, 2 NC, 3 NO, 4 T1, 5 T2

## RES_SMD
designator R?, comment 330
RESISTOR, SMD; PARAM: -W; DESC: DESCRIPTION; DIST#: MOUSER; PARAM2: 1%; VALUE: 470; MANF_P#: -; MANF: -; ASSEMBLY: ASSEMBLY; PRICE: 100= 0.5$
footprint R0402 (CHIP Resistor 1/16 WATT, 1.0X0.5mm, 0402, 1005)
footprint R0603 (CHIP Resistor 1/10 WATT, 1.6x0.8mm, 0603, 1608)
footprint R0805 (CHIP RESISTOR 1/8 WATT ,2.0X1.3mm, 0805, 2012)
footprint R1206 (CHIP RESISTOR 1/4 WATT, Body 3.2x1.6mm,1206, 3216)
footprint R2512 (CHIP RESISTOR 1 WATT, 6.4X3.2mm, 2512, 6432)
footprint R2010 (CHIP RESISTOR 3/4 WATT, 5.1x3mm, 2010, 5025)
footprint R1210 (CHIP RESISTOR 1/2 WATT, Body 3.2x2.5mm,1210, 3225)
footprint R0201 (CHIP Capacitor, 0.5x0.25mm, 0201)
footprint TO220_3
pins: 1, 2

## RES_SMD_1
designator R?, comment 1.6K
RESISTOR, SMD; PARAM: -W; DESC: DESCRIPTION; DIST#: MOUSER; PARAM2: 1%; VALUE: 470; MANF_P#: -; MANF: -; ASSEMBLY: ASSEMBLY; PRICE: 100= 0.5$
footprint R0402 (CHIP Resistor 1/16 WATT, 1.0X0.5mm, 0402, 1005)
footprint R0603 (CHIP Resistor 1/10 WATT, 1.6x0.8mm, 0603, 1608)
footprint R0805 (CHIP RESISTOR 1/8 WATT ,2.0X1.3mm, 0805, 2012)
footprint R1206 (CHIP RESISTOR 1/4 WATT, Body 3.2x1.6mm,1206, 3216)
footprint R2512 (CHIP RESISTOR 1 WATT, 6.4X3.2mm, 2512, 6432)
footprint R2010 (CHIP RESISTOR 3/4 WATT, 5.1x3mm, 2010, 5025)
footprint R1210 (CHIP RESISTOR 1/2 WATT, Body 3.2x2.5mm,1210, 3225)
footprint R0201 (CHIP Capacitor, 0.5x0.25mm, 0201)
footprint TO220_3
pins: 1, 2

## RES_SMD_2
designator R?, comment 3K
RESISTOR, SMD; PARAM: -W; DESC: DESCRIPTION; DIST#: MOUSER; PARAM2: 1%; VALUE: 470; MANF_P#: -; MANF: -; ASSEMBLY: ASSEMBLY; PRICE: 100= 0.5$
footprint R0402 (CHIP Resistor 1/16 WATT, 1.0X0.5mm, 0402, 1005)
footprint R0603 (CHIP Resistor 1/10 WATT, 1.6x0.8mm, 0603, 1608)
footprint R0805 (CHIP RESISTOR 1/8 WATT ,2.0X1.3mm, 0805, 2012)
footprint R1206 (CHIP RESISTOR 1/4 WATT, Body 3.2x1.6mm,1206, 3216)
footprint R2512 (CHIP RESISTOR 1 WATT, 6.4X3.2mm, 2512, 6432)
footprint R2010 (CHIP RESISTOR 3/4 WATT, 5.1x3mm, 2010, 5025)
footprint R1210 (CHIP RESISTOR 1/2 WATT, Body 3.2x2.5mm,1210, 3225)
footprint R0201 (CHIP Capacitor, 0.5x0.25mm, 0201)
footprint TO220_3
pins: 1, 2

## RES_SMD_3
designator R?, comment 1K
RESISTOR, SMD; PARAM: -W; DESC: DESCRIPTION; DIST#: MOUSER; PARAM2: 1%; VALUE: 470; MANF_P#: -; MANF: -; ASSEMBLY: ASSEMBLY; PRICE: 100= 0.5$
footprint R0402 (CHIP Resistor 1/16 WATT, 1.0X0.5mm, 0402, 1005)
footprint R0603 (CHIP Resistor 1/10 WATT, 1.6x0.8mm, 0603, 1608)
footprint R0805 (CHIP RESISTOR 1/8 WATT ,2.0X1.3mm, 0805, 2012)
footprint R1206 (CHIP RESISTOR 1/4 WATT, Body 3.2x1.6mm,1206, 3216)
footprint R2512 (CHIP RESISTOR 1 WATT, 6.4X3.2mm, 2512, 6432)
footprint R2010 (CHIP RESISTOR 3/4 WATT, 5.1x3mm, 2010, 5025)
footprint R1210 (CHIP RESISTOR 1/2 WATT, Body 3.2x2.5mm,1210, 3225)
footprint R0201 (CHIP Capacitor, 0.5x0.25mm, 0201)
footprint TO220_3
pins: 1, 2

## RES_SMD_4
designator R?, comment 100K
RESISTOR, SMD; PARAM: -W; DESC: DESCRIPTION; DIST#: MOUSER; PARAM2: 1%; VALUE: 470; MANF_P#: -; MANF: -; ASSEMBLY: ASSEMBLY; PRICE: 100= 0.5$
footprint R0402 (CHIP Resistor 1/16 WATT, 1.0X0.5mm, 0402, 1005)
footprint R0603 (CHIP Resistor 1/10 WATT, 1.6x0.8mm, 0603, 1608)
footprint R0805 (CHIP RESISTOR 1/8 WATT ,2.0X1.3mm, 0805, 2012)
footprint R1206 (CHIP RESISTOR 1/4 WATT, Body 3.2x1.6mm,1206, 3216)
footprint R2512 (CHIP RESISTOR 1 WATT, 6.4X3.2mm, 2512, 6432)
footprint R2010 (CHIP RESISTOR 3/4 WATT, 5.1x3mm, 2010, 5025)
footprint R1210 (CHIP RESISTOR 1/2 WATT, Body 3.2x2.5mm,1210, 3225)
footprint R0201 (CHIP Capacitor, 0.5x0.25mm, 0201)
footprint TO220_3
pins: 1, 2

## RES_SMD_5
designator R?, comment 0
RESISTOR, SMD; PARAM: -W; DESC: DESCRIPTION; DIST#: MOUSER; PARAM2: 1%; VALUE: 470; MANF_P#: -; MANF: -; ASSEMBLY: ASSEMBLY; PRICE: 100= 0.5$
footprint R0402 (CHIP Resistor 1/16 WATT, 1.0X0.5mm, 0402, 1005)
footprint R0603 (CHIP Resistor 1/10 WATT, 1.6x0.8mm, 0603, 1608)
footprint R0805 (CHIP RESISTOR 1/8 WATT ,2.0X1.3mm, 0805, 2012)
footprint R1206 (CHIP RESISTOR 1/4 WATT, Body 3.2x1.6mm,1206, 3216)
footprint R2512 (CHIP RESISTOR 1 WATT, 6.4X3.2mm, 2512, 6432)
footprint R2010 (CHIP RESISTOR 3/4 WATT, 5.1x3mm, 2010, 5025)
footprint R1210 (CHIP RESISTOR 1/2 WATT, Body 3.2x2.5mm,1210, 3225)
footprint R0201 (CHIP Capacitor, 0.5x0.25mm, 0201)
footprint TO220_3
pins: 1, 2

## RES_SMD_6
designator R?, comment 10K
RESISTOR, SMD; PARAM: -W; DESC: DESCRIPTION; DIST#: MOUSER; PARAM2: 1%; VALUE: 470; MANF_P#: -; MANF: -; ASSEMBLY: ASSEMBLY; PRICE: 100= 0.5$
footprint R0402 (CHIP Resistor 1/16 WATT, 1.0X0.5mm, 0402, 1005)
footprint R0603 (CHIP Resistor 1/10 WATT, 1.6x0.8mm, 0603, 1608)
footprint R0805 (CHIP RESISTOR 1/8 WATT ,2.0X1.3mm, 0805, 2012)
footprint R1206 (CHIP RESISTOR 1/4 WATT, Body 3.2x1.6mm,1206, 3216)
footprint R2512 (CHIP RESISTOR 1 WATT, 6.4X3.2mm, 2512, 6432)
footprint R2010 (CHIP RESISTOR 3/4 WATT, 5.1x3mm, 2010, 5025)
footprint R1210 (CHIP RESISTOR 1/2 WATT, Body 3.2x2.5mm,1210, 3225)
footprint R0201 (CHIP Capacitor, 0.5x0.25mm, 0201)
footprint TO220_3
pins: 1, 2

## RES_SMD_7
designator R?, comment 33
RESISTOR, SMD; PARAM: -W; DESC: DESCRIPTION; DIST#: MOUSER; PARAM2: 1%; MANF_P#: -; MANF: -; ASSEMBLY: ASSEMBLY; PRICE: 100= 0.5$
footprint R0402 (CHIP Resistor 1/16 WATT, 1.0X0.5mm, 0402, 1005)
footprint R0603 (CHIP Resistor 1/10 WATT, 1.6x0.8mm, 0603, 1608)
footprint R0805 (CHIP RESISTOR 1/8 WATT ,2.0X1.3mm, 0805, 2012)
footprint R1206 (CHIP RESISTOR 1/4 WATT, Body 3.2x1.6mm,1206, 3216)
footprint R2512 (CHIP RESISTOR 1 WATT, 6.4X3.2mm, 2512, 6432)
footprint R2010 (CHIP RESISTOR 3/4 WATT, 5.1x3mm, 2010, 5025)
footprint R1210 (CHIP RESISTOR 1/2 WATT, Body 3.2x2.5mm,1210, 3225)
footprint R0201 (CHIP Capacitor, 0.5x0.25mm, 0201)
pins: 1, 2

## RES_SMD_8
designator R?, comment 10k
RESISTOR, SMD; PARAM: -W; DESC: DESCRIPTION; DIST#: MOUSER; PARAM2: 1%; MANF_P#: -; MANF: -; ASSEMBLY: ASSEMBLY; PRICE: 100= 0.5$
footprint R0402 (CHIP Resistor 1/16 WATT, 1.0X0.5mm, 0402, 1005)
footprint R0603 (CHIP Resistor 1/10 WATT, 1.6x0.8mm, 0603, 1608)
footprint R0805 (CHIP RESISTOR 1/8 WATT ,2.0X1.3mm, 0805, 2012)
footprint R1206 (CHIP RESISTOR 1/4 WATT, Body 3.2x1.6mm,1206, 3216)
footprint R2512 (CHIP RESISTOR 1 WATT, 6.4X3.2mm, 2512, 6432)
footprint R2010 (CHIP RESISTOR 3/4 WATT, 5.1x3mm, 2010, 5025)
footprint R1210 (CHIP RESISTOR 1/2 WATT, Body 3.2x2.5mm,1210, 3225)
footprint R0201 (CHIP Capacitor, 0.5x0.25mm, 0201)
pins: 1, 2

## RES_SMD_9
designator R?, comment 100
RESISTOR, SMD; PARAM: -W; DESC: DESCRIPTION; DIST#: MOUSER; PARAM2: 1%; MANF_P#: -; MANF: -; ASSEMBLY: ASSEMBLY; PRICE: 100= 0.5$
footprint R0402 (CHIP Resistor 1/16 WATT, 1.0X0.5mm, 0402, 1005)
footprint R0603 (CHIP Resistor 1/10 WATT, 1.6x0.8mm, 0603, 1608)
footprint R0805 (CHIP RESISTOR 1/8 WATT ,2.0X1.3mm, 0805, 2012)
footprint R1206 (CHIP RESISTOR 1/4 WATT, Body 3.2x1.6mm,1206, 3216)
footprint R2512 (CHIP RESISTOR 1 WATT, 6.4X3.2mm, 2512, 6432)
footprint R2010 (CHIP RESISTOR 3/4 WATT, 5.1x3mm, 2010, 5025)
footprint R1210 (CHIP RESISTOR 1/2 WATT, Body 3.2x2.5mm,1210, 3225)
footprint R0201 (CHIP Capacitor, 0.5x0.25mm, 0201)
pins: 1, 2

## RES_SMD_10
designator R?, comment 0
RESISTOR, SMD; PARAM: -W; DESC: DESCRIPTION; DIST#: MOUSER; PARAM2: 1%; MANF_P#: -; MANF: -; ASSEMBLY: ASSEMBLY; PRICE: 100= 0.5$
footprint R0402 (CHIP Resistor 1/16 WATT, 1.0X0.5mm, 0402, 1005)
footprint R0603 (CHIP Resistor 1/10 WATT, 1.6x0.8mm, 0603, 1608)
footprint R0805 (CHIP RESISTOR 1/8 WATT ,2.0X1.3mm, 0805, 2012)
footprint R1206 (CHIP RESISTOR 1/4 WATT, Body 3.2x1.6mm,1206, 3216)
footprint R2512 (CHIP RESISTOR 1 WATT, 6.4X3.2mm, 2512, 6432)
footprint R2010 (CHIP RESISTOR 3/4 WATT, 5.1x3mm, 2010, 5025)
footprint R1210 (CHIP RESISTOR 1/2 WATT, Body 3.2x2.5mm,1210, 3225)
footprint R0201 (CHIP Capacitor, 0.5x0.25mm, 0201)
pins: 1, 2

## RES_SMD_11
designator R?, comment 1K
RESISTOR, SMD; PARAM: -W; DESC: DESCRIPTION; DIST#: MOUSER; PARAM2: 1%; MANF_P#: -; MANF: -; ASSEMBLY: ASSEMBLY; PRICE: 100= 0.5$
footprint R0402 (CHIP Resistor 1/16 WATT, 1.0X0.5mm, 0402, 1005)
footprint R0603 (CHIP Resistor 1/10 WATT, 1.6x0.8mm, 0603, 1608)
footprint R0805 (CHIP RESISTOR 1/8 WATT ,2.0X1.3mm, 0805, 2012)
footprint R1206 (CHIP RESISTOR 1/4 WATT, Body 3.2x1.6mm,1206, 3216)
footprint R2512 (CHIP RESISTOR 1 WATT, 6.4X3.2mm, 2512, 6432)
footprint R2010 (CHIP RESISTOR 3/4 WATT, 5.1x3mm, 2010, 5025)
footprint R1210 (CHIP RESISTOR 1/2 WATT, Body 3.2x2.5mm,1210, 3225)
footprint R0201 (CHIP Capacitor, 0.5x0.25mm, 0201)
pins: 1, 2

## RES_SMD_12
designator R?, comment 4.7K
RESISTOR, SMD; PARAM: -W; DESC: DESCRIPTION; DIST#: MOUSER; PARAM2: 1%; VALUE: 470; MANF_P#: -; MANF: -; ASSEMBLY: ASSEMBLY; PRICE: 100= 0.5$
footprint R0402 (CHIP Resistor 1/16 WATT, 1.0X0.5mm, 0402, 1005)
footprint R0603 (CHIP Resistor 1/10 WATT, 1.6x0.8mm, 0603, 1608)
footprint R0805 (CHIP RESISTOR 1/8 WATT ,2.0X1.3mm, 0805, 2012)
footprint R1206 (CHIP RESISTOR 1/4 WATT, Body 3.2x1.6mm,1206, 3216)
footprint R2512 (CHIP RESISTOR 1 WATT, 6.4X3.2mm, 2512, 6432)
footprint R2010 (CHIP RESISTOR 3/4 WATT, 5.1x3mm, 2010, 5025)
footprint R1210 (CHIP RESISTOR 1/2 WATT, Body 3.2x2.5mm,1210, 3225)
footprint R0201 (CHIP Capacitor, 0.5x0.25mm, 0201)
footprint TO220_3
pins: 1, 2

## RES_SMD_13
designator R?, comment 100
RESISTOR, SMD; PARAM: -W; DESC: DESCRIPTION; DIST#: MOUSER; PARAM2: 1%; VALUE: 470; MANF_P#: -; MANF: -; ASSEMBLY: ASSEMBLY; PRICE: 100= 0.5$
footprint R0402 (CHIP Resistor 1/16 WATT, 1.0X0.5mm, 0402, 1005)
footprint R0603 (CHIP Resistor 1/10 WATT, 1.6x0.8mm, 0603, 1608)
footprint R0805 (CHIP RESISTOR 1/8 WATT ,2.0X1.3mm, 0805, 2012)
footprint R1206 (CHIP RESISTOR 1/4 WATT, Body 3.2x1.6mm,1206, 3216)
footprint R2512 (CHIP RESISTOR 1 WATT, 6.4X3.2mm, 2512, 6432)
footprint R2010 (CHIP RESISTOR 3/4 WATT, 5.1x3mm, 2010, 5025)
footprint R1210 (CHIP RESISTOR 1/2 WATT, Body 3.2x2.5mm,1210, 3225)
footprint R0201 (CHIP Capacitor, 0.5x0.25mm, 0201)
footprint TO220_3
pins: 1, 2

## RES_SMD_14
designator R?, comment 470K
RESISTOR, SMD; PARAM: -W; DESC: DESCRIPTION; DIST#: MOUSER; PARAM2: 1%; VALUE: 470; MANF_P#: -; MANF: -; ASSEMBLY: ASSEMBLY; PRICE: 100= 0.5$
footprint R0402 (CHIP Resistor 1/16 WATT, 1.0X0.5mm, 0402, 1005)
footprint R0603 (CHIP Resistor 1/10 WATT, 1.6x0.8mm, 0603, 1608)
footprint R0805 (CHIP RESISTOR 1/8 WATT ,2.0X1.3mm, 0805, 2012)
footprint R1206 (CHIP RESISTOR 1/4 WATT, Body 3.2x1.6mm,1206, 3216)
footprint R2512 (CHIP RESISTOR 1 WATT, 6.4X3.2mm, 2512, 6432)
footprint R2010 (CHIP RESISTOR 3/4 WATT, 5.1x3mm, 2010, 5025)
footprint R1210 (CHIP RESISTOR 1/2 WATT, Body 3.2x2.5mm,1210, 3225)
footprint R0201 (CHIP Capacitor, 0.5x0.25mm, 0201)
footprint TO220_3
pins: 1, 2

## RES_THD
designator R?, comment 100
RESISTOR, THD; MANF_P#: RK73H1ETTP4701F; MANF: KOA SPEER; PARAM: 0.063W; DESC: DESCRIPTION; DIST#: MOUSER; PARAM2: 1%; ASSEMBLY: ASSEMBLY; PRICE: 100= 0.5$; VALUE: 100
footprint R0125W_AX025 (RESISTOR 1/8 WATT, AXIAL0.25)
footprint R1W_AX06 (RESISTOR 1 WATT, AXIAL0.6)
footprint R2W_AX08 (RESISTOR 2 WATT, AXIAL0.8)
footprint R2W_AX_VER (RESISTOR 2 WATT, AXIAL0.8)
footprint R3W_AX09 (RESISTOR 3 WATT, AXIAL0.9)
footprint RWW4W (RESISTOR 4 WATT, Ceramic Wirewound)
footprint R05W_AX05 (RESISTOR 0.5 WATT, AXIAL0.5)
footprint R025W_AX04 (RESISTOR 1/4 WATT, AXIAL0.4)
footprint R025W_AX_VER (RESISTOR 1/4 WATT, AXIAL0.4)
footprint R0125W_AX03 (RESISTOR 1/8 WATT, AXIAL0.3 INCH SPACING)
footprint R0125W_AX_VER (RESISTOR 1/8 WATT, AXIAL0.25)
footprint RWW2W_VER (RESISTOR 2 WATT, Wirewound)
footprint RWW10W_VER (RESISTOR 10 WATT, Wirewound)
footprint R10W_AX11 (RESISTOR 10 WATT, AXIAL1.1)
footprint R10W_AX14 (RESISTOR 10 WATT, AXIAL1.4)
footprint R10W_AX20 (RESISTOR 10 WATT, AXIAL2.0)
footprint RWW5W (Footprint not found)
footprint RWW5W_VER (Footprint not found)
pins: 1, 2

## RES_THD_POT_3296X
designator R?, comment POT10K
RESISTOR, THD, Potentiometer; VALUE: POT10K
footprint POT_3296X (POT, TRIM, 10.0X5.0mm, pitch: 2.5mm, MURATA, PV36X 3296X)
pins: 1 TOP, 2 TAP, 3 BOT

## SMBJ18CA
designator D?, comment SMBJ5.0A
footprint DO-214AA(SMA)
pins: 1, 2

## STM32F103C8T6_QFP48
designator U?, comment STM32F103  (value not drawn)
MCU, STM32 ARM 32-bit, Cortex M3, 64KB FLASH, 20KB SRAM; DESC: CAN, I2C, SPI, USART, USB; MANF: ST; MANF_P#: STM32F103C8T6; PARAM2: 2~3.6VCC, 72MHz, 2X12Bit ADC; PARAM: 64KB FLASH, 20KB SRAM, -40~85oC; PRICE: 6$; VALUE: STM32F103; PACKAGE: QFP-48
footprint QFG50_48 (LQFP48, PQFF, PQFG, TSQFP, 48-Leads, Body 7.00x7.00mm, Pitch 0.50mm)
pins: 1 VBAT, 2 PC13/TAMPER_RTC (io) "PC13-TAMPER-RTC/PC13/TAMPER-RTC", 3 PC14/OSC32_IN (io) "PC14-OSC32_IN/PC14/OSC32_IN", 4 PC15/OSC32_OUT (io) "PC15-OSC32_OUT/PC15/OSC32_OUT", 5 PD0/OSC_IN (io) "PD0/OSC_IN/CAN_RX", 6 PD1/OSC_OUT (io) "PD1/OSC_OUT/CAN_TX", 7 NRST, 8 VSSA, 9 VDDA, 10 PA0/WKUP/USART2_CTS/ADC12_IN0/TIM2_CH1_ETR (io) "PA0-WKUP/PA0/WKUP/USART2_CTS/ADC12_IN0/TIM2_CH1_ETR", 11 PA1/USART2_RTS/  ADC12_IN1/TIM2_CH2 (io) "PA1/USART2_RTS/ADC12_IN1/TIM2_CH2", 12 PA2/USART2_TX/ADC12_IN2/TIM2_CH3 (io), 13 PA3/USART2_RX/ADC12_IN3/TIM2_CH4 (io), 14 PA4/SPI1_NSS/USART2_CK/ADC12_IN4 (io), 15 PA5/SPI1_SCK/ADC12_IN5 (io), 16 PA6/SPI1_MISO/  ADC12_IN6/TIM3_CH1 (io) "PA6/SPI1_MISO/ADC12_IN6/TIM3_CH1/TIM1_BKIN", 17 PA7/SPI1_MOSI/ADC12_IN7/TIM3_CH2 (io) "PA7/SPI1_MOSI/ADC12_IN7/TIM3_CH2/TIM1_CH1N", 18 PB0/ADC12_IN8/TIM3_CH3 (io) "PB0/ADC12_IN8/TIM3_CH3/TIM1_CH2N", 19 PB1/ADC12_IN9/TIM3_CH4 (io) "PB1/ADC12_IN9/TIM3_CH4/TIM1_CH3N", 20 PB2/BOOT1, 21 PB10/I2C2_SCL/USART3_TX (io) "PB10/I2C2_SCL/USART3_TX/TIM2_CH3", 22 PB11/I2C2_SDA/USART3_RX (io) "PB11/I2C2_SDA/USART3_RX/TIM2_CH4", 23 VSS_1, 24 VDD_1, 25 PB12/SPI2_NSS/I2C2_SMBAl/USART3_CK/TIM1_BKIN (io), 26 PB13/SPI2_SCK/USART3_CTS/TIM1_CH1N (io), 27 PB14/SPI2_MISO/USART3_RTS/TIM1_CH2N (io), 28 PB15/SPI2_MOSI/TIM1_CH3N (io), 29 PA8/USART1_CK/TIM1_CH1/MCO (io), 30 PA9/USART1_TX/TIM1_CH2 (io), 31 PA10/USART1_RX/TIM1_CH3 (io), 32 PA11/USART1_CTS/CANRX/USBDM/TIM1_CH4 (io), 33 PA12/USART1_RTS/CANTX/USBDP/TIM1_ETR (io), 34 PA13/JTMS/SWDIO, 35 VSS_2, 36 VDD_2, 37 PA14/JTCK/SWCLK, 38 PA15/JTDI/TIM2_CH1_ETR/SPI1_NSS, 39 PB3/JTDO/TIM2_CH2/TRACESWO/SPI1_SCK, 40 PB4/JNTRST/TIM3_CH1/SPI1_MISO, 41 PB5/I2C1_SMBAl/TIM3_CH2/SPI1_MOSI (io) "PB5/I2C1_SMBAI/TIM3_CH2/SPI1_MOSI", 42 PB6/I2C1_SCL/TIM4_CH1/USART1_TX (io), 43 PB7/I2C1_SDA/TIM4_CH2/USART1_RX (io), 44 BOOT0, 45 PB8/TIM4_CH3/I2C1_SCL/CANRX (io), 46 PB9/TIM4_CH4/I2C1_SDA/CANTX (io), 47 VSS_3, 48 VDD_3

## Switch PB
designator S?  (value not drawn)
Push Button Switch
footprint Switch - Push to On
footprint SW-PB
pins: 1, 2

## TESTPOINT_M_WHT
designator TP?  (value not drawn)  (no BOM)
TEST POINT; MANF: MANF; MANF_P#: MANF_P#; VALUE: VALUE
footprint TPTHD_B_WHT (TEST POINT KEYSTONE 2.5mm WITH 1 mm Hole Diameter)
pins: 1

## TMP_LM35_TO92
designator U?, comment LM35
SENSOR, TEMP, ANALOG, -55~150oC, 4~20Vcc, Out 0mV + 10mV/oC; MANF_P#: LM35CZ, LM35CAZ or LM35DZ; MANF: TI; PARAM: 0.5°C Accuracy, 10mV/oC, -55~150oC; PARAM2: 4~20Vcc; PRICE: 7$; VALUE: LM35
footprint TO92_3 (TO-92)
pins: 1 G, 2 O, 3 V

## XH_4
designator J?, comment MQ2
PW10-x-M, JST-BxB-XH-A pitch: 2.5mm, 3A/250v; MANF: JST; MANF_P#: B4B-XH-A; PARAM2: 250v; PARAM: 3.0A; VALUE: MQ2
footprint XH_4 (PW10-xx-M, JST-BxB-XH-A pitch: 2.5mm)
pins: 1, 2, 3, 4

## XH_4_1
designator J?, comment MQ9
PW10-x-M, JST-BxB-XH-A pitch: 2.5mm, 3A/250v; MANF: JST; MANF_P#: B4B-XH-A; PARAM2: 250v; PARAM: 3.0A; VALUE: MQ9
footprint XH_4 (PW10-xx-M, JST-BxB-XH-A pitch: 2.5mm)
pins: 1, 2, 3, 4

## XTL_2_HC49_8MHz_SMD
designator X?, comment XTL_8MHz
Crystal MOST POPULAR ABL HC49 PACKAGE; MANF: ABRACON; MANF_P#: ABLS-8.000MHZ-B4-T; PARAM: 8MHz, 18pF, 30PPM, -20~70oC; PRICE: 0.3$; VALUE: XTL_8MHz
footprint XTL_2_11X5 (SMD crystal resonator, ABL, ABLS, HC-49, HC49 11X4.5MM)
pins: 1 OSC1, 2 OSC2